# Altium footprint library GD32L233RCT6.PcbLib: 3 footprints
Each footprint in its own frame and in the unit in brackets; x right, y up, seen from the top. Pads: shape width x height; smd on the part's side, far side on the other; paste and mask are expansions set on the pad; w line width, h text height; cw(c..) or ccw(c..) is an arc to the next point about the centre after c.
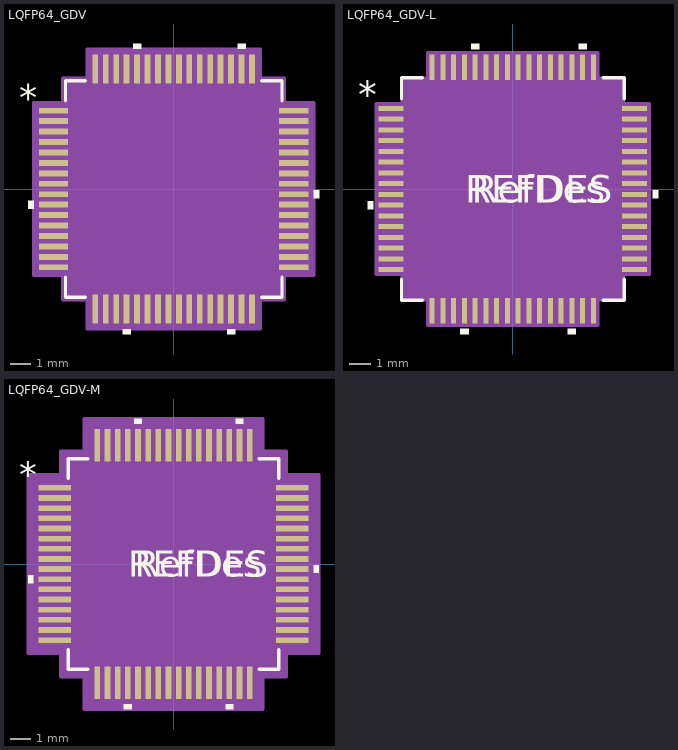
[diagram p0: the footprints below, top view; thin cyan lines are the x and y axes]

## LQFP64_GDV [mil]
pads (64):
  rect 55x11 smd paste+0 mask+0: 1(-226.5,147.64) 2(-226.5,127.95) 3(-226.5,108.27) 4(-226.5,88.58) 5(-226.5,68.9) 6(-226.5,49.21) 7(-226.5,29.53) 8(-226.5,9.84) 9(-226.5,-9.84) 10(-226.5,-29.53) 11(-226.5,-49.21) 12(-226.5,-68.9) 13(-226.5,-88.58) 14(-226.5,-108.27) 15(-226.5,-127.95) 16(-226.5,-147.64) 33(226.5,-147.64) 34(226.5,-127.95) 35(226.5,-108.27) 36(226.5,-88.58) 37(226.5,-68.9) 38(226.5,-49.21) 39(226.5,-29.53) 40(226.5,-9.84) 41(226.5,9.84) 42(226.5,29.53) 43(226.5,49.21) 44(226.5,68.9) 45(226.5,88.58) 46(226.5,108.27) 47(226.5,127.95) 48(226.5,147.64)
  rect 11x55 smd paste+0 mask+0: 17(-147.64,-226.5) 18(-127.95,-226.5) 19(-108.27,-226.5) 20(-88.58,-226.5) 21(-68.9,-226.5) 22(-49.21,-226.5) 23(-29.53,-226.5) 24(-9.84,-226.5) 25(9.84,-226.5) 26(29.53,-226.5) 27(49.21,-226.5) 28(68.9,-226.5) 29(88.58,-226.5) 30(108.27,-226.5) 31(127.95,-226.5) 32(147.64,-226.5) 49(147.64,226.5) 50(127.95,226.5) 51(108.27,226.5) 52(88.58,226.5) 53(68.9,226.5) 54(49.21,226.5) 55(29.53,226.5) 56(9.84,226.5) 57(-9.84,226.5) 58(-29.53,226.5) 59(-49.21,226.5) 60(-68.9,226.5) 61(-88.58,226.5) 62(-108.27,226.5) 63(-127.95,226.5) 64(-147.64,226.5)
Top Overlay:
  region: -61.4,264 -76.4,264 -76.4,274 -61.4,274
  region: 135.45,264 120.45,264 120.45,274 135.45,274
  region: 264,-2.34 274,-2.34 274,-17.34 264,-17.34
  region: 115.77,-264 100.77,-264 100.77,-274 115.77,-274
  region: -81.08,-264 -96.08,-264 -96.08,-274 -81.08,-274
  region: -264,-22.03 -274,-22.03 -274,-37.03 -264,-37.03
  lines w6: -204,-166.24 -204,-204 -166.24,-204 ; -204,166.24 -204,204 -166.24,204 ; 166.24,-204 204,-204 204,-166.24 ; 166.24,204 204,204 204,166.24
  text "*" at -291.5,147.48 h50
Mechanical 13:
  drawing of 261 lines, arcs and shapes, not listed
  text "*" at -196.5,132.48 h50
Mechanical 15:
  region: -163.14,-209 -209,-209 -209,-163.14 -264,-163.14 -264,163.14 -209,163.14 -209,209 -163.14,209 -163.14,264 163.14,264 163.14,209 209,209 209,163.14 264,163.14 264,-163.14 209,-163.14 209,-209 163.14,-209 163.14,-264 -163.14,-264
  lines w6: -264,-163.14 -264,163.14 -209,163.14 -209,209 -163.14,209 -163.14,264 163.14,264 163.14,209 209,209 209,163.14 264,163.14 264,-163.14 209,-163.14 209,-209 163.14,-209 163.14,-264 -163.14,-264 -163.14,-209 -209,-209 -209,-163.14 -264,-163.14
3D body "LQFP64_GDV.step": height 63.11, standoff 0, extent -240,-240 240,240

## LQFP64_GDV-L [mil]
pads (64):
  rect 46x9 smd paste+0 mask+0: 1(-223,147.64) 2(-223,127.95) 3(-223,108.27) 4(-223,88.58) 5(-223,68.9) 6(-223,49.21) 7(-223,29.53) 8(-223,9.84) 9(-223,-9.84) 10(-223,-29.53) 11(-223,-49.21) 12(-223,-68.9) 13(-223,-88.58) 14(-223,-108.27) 15(-223,-127.95) 16(-223,-147.64) 33(223,-147.64) 34(223,-127.95) 35(223,-108.27) 36(223,-88.58) 37(223,-68.9) 38(223,-49.21) 39(223,-29.53) 40(223,-9.84) 41(223,9.84) 42(223,29.53) 43(223,49.21) 44(223,68.9) 45(223,88.58) 46(223,108.27) 47(223,127.95) 48(223,147.64)
  rect 9x46 smd paste+0 mask+0: 17(-147.64,-223) 18(-127.95,-223) 19(-108.27,-223) 20(-88.58,-223) 21(-68.9,-223) 22(-49.21,-223) 23(-29.53,-223) 24(-9.84,-223) 25(9.84,-223) 26(29.53,-223) 27(49.21,-223) 28(68.9,-223) 29(88.58,-223) 30(108.27,-223) 31(127.95,-223) 32(147.64,-223) 49(147.64,223) 50(127.95,223) 51(108.27,223) 52(88.58,223) 53(68.9,223) 54(49.21,223) 55(29.53,223) 56(9.84,223) 57(-9.84,223) 58(-29.53,223) 59(-49.21,223) 60(-68.9,223) 61(-88.58,223) 62(-108.27,223) 63(-127.95,223) 64(-147.64,223)
Top Overlay:
  region: -256,-22.03 -266,-22.03 -266,-37.03 -256,-37.03
  region: -81.08,-256 -96.08,-256 -96.08,-266 -81.08,-266
  region: 115.77,-256 100.77,-256 100.77,-266 115.77,-266
  region: 256,-2.34 266,-2.34 266,-17.34 256,-17.34
  region: 135.45,256 120.45,256 120.45,266 135.45,266
  region: -61.4,256 -76.4,256 -76.4,266 -61.4,266
  lines w6: -204,-165.24 -204,-204 -165.24,-204 ; -204,165.24 -204,204 -165.24,204 ; 165.24,-204 204,-204 204,-165.24 ; 165.24,204 204,204 204,165.24
  text "*" at -283.5,147.48 h50
  text "RefDes" at -75,-25 h50
  text "REFDES" at -87.5,-25 h50
Mechanical 13:
  drawing of 261 lines, arcs and shapes, not listed
  text "*" at -196.5,132.48 h50
  text "RefDes2" at -87.5,-25 h50
Mechanical 15:
  region: -156.14,-203 -203,-203 -203,-156.14 -250,-156.14 -250,156.14 -203,156.14 -203,203 -156.14,203 -156.14,250 156.14,250 156.14,203 203,203 203,156.14 250,156.14 250,-156.14 203,-156.14 203,-203 156.14,-203 156.14,-250 -156.14,-250
  lines w6: -250,-156.14 -203,-156.14 -203,-203 -156.14,-203 -156.14,-250 156.14,-250 156.14,-203 203,-203 203,-156.14 250,-156.14 250,156.14 203,156.14 203,203 156.14,203 156.14,250 -156.14,250 -156.14,203 -203,203 -203,156.14 -250,156.14 -250,-156.14
3D body "LQFP64_GDV.step": height 63.11, standoff 0, extent -240,-240 240,240

## LQFP64_GDV-M [mil]
pads (64):
  rect 63x11 smd paste+0 mask+0: 1(-230.5,147.64) 2(-230.5,127.95) 3(-230.5,108.27) 4(-230.5,88.58) 5(-230.5,68.9) 6(-230.5,49.21) 7(-230.5,29.53) 8(-230.5,9.84) 9(-230.5,-9.84) 10(-230.5,-29.53) 11(-230.5,-49.21) 12(-230.5,-68.9) 13(-230.5,-88.58) 14(-230.5,-108.27) 15(-230.5,-127.95) 16(-230.5,-147.64) 33(230.5,-147.64) 34(230.5,-127.95) 35(230.5,-108.27) 36(230.5,-88.58) 37(230.5,-68.9) 38(230.5,-49.21) 39(230.5,-29.53) 40(230.5,-9.84) 41(230.5,9.84) 42(230.5,29.53) 43(230.5,49.21) 44(230.5,68.9) 45(230.5,88.58) 46(230.5,108.27) 47(230.5,127.95) 48(230.5,147.64)
  rect 11x63 smd paste+0 mask+0: 17(-147.64,-230.5) 18(-127.95,-230.5) 19(-108.27,-230.5) 20(-88.58,-230.5) 21(-68.9,-230.5) 22(-49.21,-230.5) 23(-29.53,-230.5) 24(-9.84,-230.5) 25(9.84,-230.5) 26(29.53,-230.5) 27(49.21,-230.5) 28(68.9,-230.5) 29(88.58,-230.5) 30(108.27,-230.5) 31(127.95,-230.5) 32(147.64,-230.5) 49(147.64,230.5) 50(127.95,230.5) 51(108.27,230.5) 52(88.58,230.5) 53(68.9,230.5) 54(49.21,230.5) 55(29.53,230.5) 56(9.84,230.5) 57(-9.84,230.5) 58(-29.53,230.5) 59(-49.21,230.5) 60(-68.9,230.5) 61(-88.58,230.5) 62(-108.27,230.5) 63(-127.95,230.5) 64(-147.64,230.5)
Top Overlay:
  region: -272,-22.03 -282,-22.03 -282,-37.03 -272,-37.03
  region: -81.08,-272 -96.08,-272 -96.08,-282 -81.08,-282
  region: 115.77,-272 100.77,-272 100.77,-282 115.77,-282
  region: 272,-2.34 282,-2.34 282,-17.34 272,-17.34
  region: 135.45,272 120.45,272 120.45,282 135.45,282
  region: -61.4,272 -76.4,272 -76.4,282 -61.4,282
  lines w6: -204,-166.24 -204,-204 -166.24,-204 ; -204,166.24 -204,204 -166.24,204 ; 166.24,-204 204,-204 204,-166.24 ; 166.24,204 204,204 204,166.24
  text "*" at -299.5,147.48 h50
  text "RefDes" at -75,-25 h50
  text "REFDES" at -87.5,-25 h50
Mechanical 13:
  drawing of 261 lines, arcs and shapes, not listed
  text "*" at -196.5,132.48 h50
  text "RefDes2" at -87.5,-25 h50
Mechanical 15:
  region: -173.14,-219 -219,-219 -219,-173.14 -282,-173.14 -282,173.14 -219,173.14 -219,219 -173.14,219 -173.14,282 173.14,282 173.14,219 219,219 219,173.14 282,173.14 282,-173.14 219,-173.14 219,-219 173.14,-219 173.14,-282 -173.14,-282
  lines w6: -282,-173.14 -219,-173.14 -219,-219 -173.14,-219 -173.14,-282 173.14,-282 173.14,-219 219,-219 219,-173.14 282,-173.14 282,173.14 219,173.14 219,219 173.14,219 173.14,282 -173.14,282 -173.14,219 -219,219 -219,173.14 -282,173.14 -282,-173.14
3D body "LQFP64_GDV.step": height 63.11, standoff 0, extent -240,-240 240,240